# Altium footprint library My_footprints.PcbLib: 5 footprints
Each footprint in its own frame and in the unit in brackets; x right, y up, seen from the top. Pads: shape width x height; smd on the part's side, far side on the other; paste and mask are expansions set on the pad; w line width, h text height; cw(c..) or ccw(c..) is an arc to the next point about the centre after c.
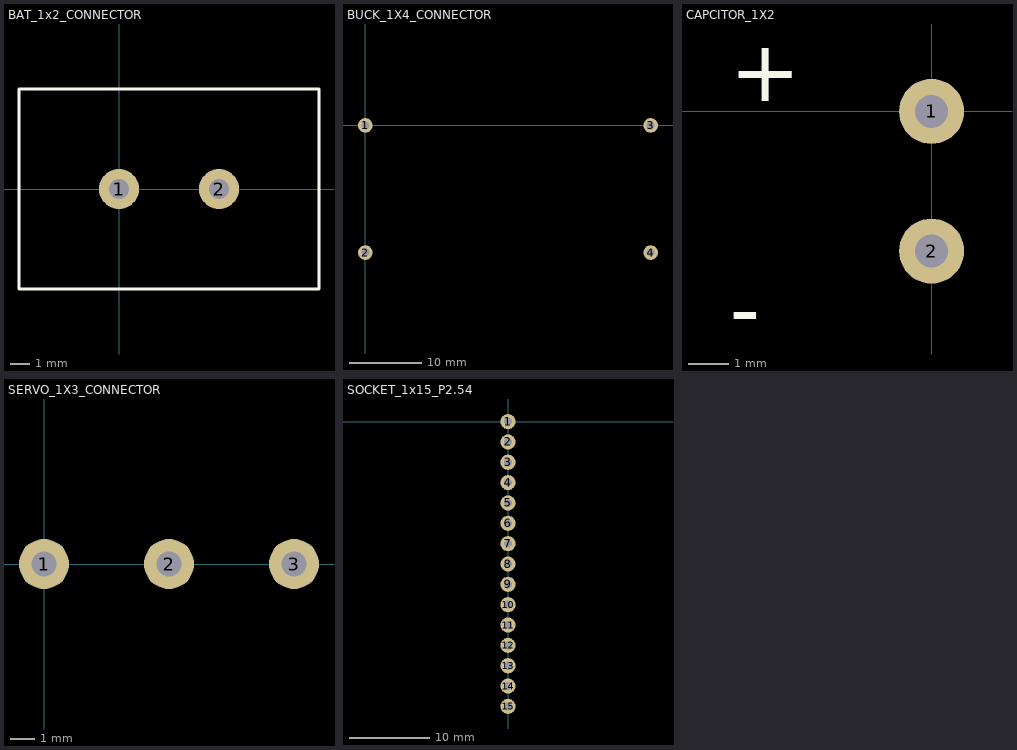
[diagram p0: the footprints below, top view; thin cyan lines are the x and y axes]

## BAT_1x2_CONNECTOR [mil]
pads (2):
  round 80 hole 40: 1(0,0) 2(200,0)
Top Overlay:
  lines w6: -200,-200 400,-200 400,200 -200,200 -200,-200

## BUCK_1X4_CONNECTOR [mil]
pads (4):
  round 80 hole 43: 1(0,0) 2(0,-693) 3(1555,0) 4(1555,-693)

## CAPCITOR_1X2 [mil]
pads (2):
  round 63 hole 32: 1(0,0) 2(0,-135)
Top Overlay:
  text "+" at -195,10 h60
  text "-" at -195,-219.99 h60

## SERVO_1X3_CONNECTOR [mil]
pads (3):
  round 80 hole 40: 1(0,0) 2(200,0) 3(400,0)

## SOCKET_1x15_P2.54 [mil]
pads (15):
  round 75 hole 40: 1(0,0) 2(0,-100) 3(0,-200) 4(0,-300) 5(0,-400) 6(0,-500) 7(0,-600) 8(0,-700) 9(0,-800) 10(0,-900) 11(0,-1000) 12(0,-1100) 13(0,-1200) 14(0,-1300) 15(0,-1400)